# Altium footprint library NTS_Integrated_IC.PcbLib: 8 footprints
Each footprint in its own frame and in the unit in brackets; x right, y up, seen from the top. Pads: shape width x height; smd on the part's side, far side on the other; paste and mask are expansions set on the pad; w line width, h text height; cw(c..) or ccw(c..) is an arc to the next point about the centre after c.
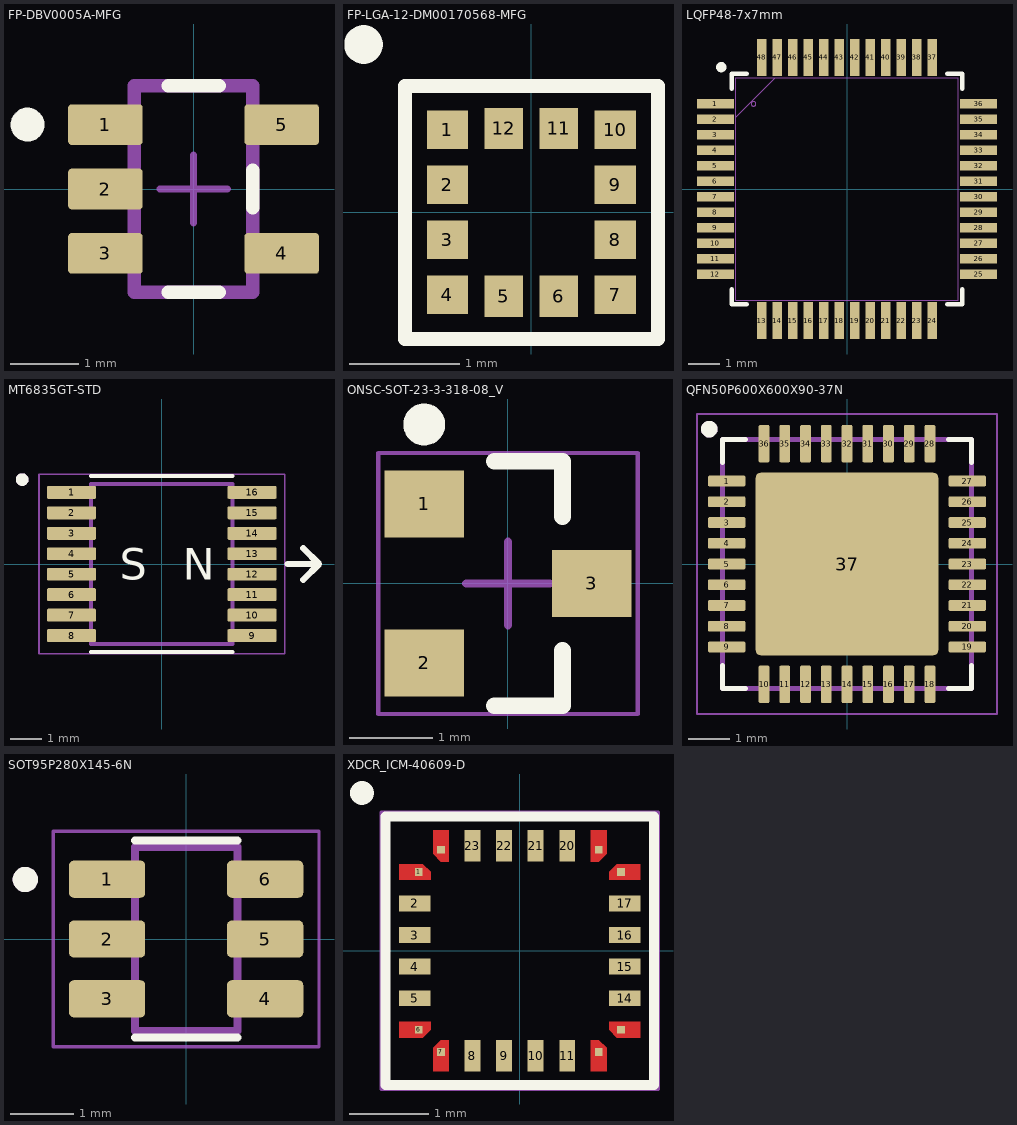
[diagram p0: the footprints below, top view; thin cyan lines are the x and y axes]

## FP-DBV0005A-MFG [mm]
height 8.54
pads (5):
  rrect17% 1.1x0.6 smd paste+0 mask+0: 1(-1.3,0.95) 2(-1.3,0) 3(-1.3,-0.95) 4(1.3,-0.95) 5(1.3,0.95)
Top Overlay:
  circle w0.25: c-2.45,0.95 r0.125
  lines w0.2: -0.375,-1.525 0.375,-1.525 ; -0.375,1.525 0.375,1.525 ; 0.875,-0.275 0.875,0.275
Top 3D Body:
  lines w0.2: -0.875,-1.525 -0.875,1.525 0.875,1.525 0.875,-1.525 -0.875,-1.525
Top Component Center:
  lines w0.1: -0.5,0 0.5,0 ; 0,-0.5 0,0.5
3D body "IC_Texas_Instruments_SN65LVDT2DBVT_eec.STEP": height 0.25, standoff 0, extent -1.95,-1.775 1.95,1.775

## FP-LGA-12-DM00170568-MFG [mm]
height 8.54
pads (12):
  rect 0.375x0.35 smd paste-1000 mask+0: 1(-0.763,0.75) 2(-0.763,0.25) 3(-0.763,-0.25) 4(-0.763,-0.75) 7(0.763,-0.75) 8(0.763,-0.25) 9(0.763,0.25) 10(0.763,0.75)
  rect 0.35x0.375 smd paste-1000 mask+0: 5(-0.25,-0.763) 6(0.25,-0.763) 11(0.25,0.763) 12(-0.25,0.763)
Top Overlay:
  circle w0.25: c-1.525,1.525 r0.05
  lines w0.127: -1.15,-1.15 -1.15,1.15 1.15,1.15 1.15,-1.15 -1.15,-1.15
Top Paste:
  rectangle: -0.93,0.093 -0.595,0.407
  rectangle: 0.595,0.093 0.93,0.407
  rectangle: -0.93,0.593 -0.595,0.907
  rectangle: 0.595,0.593 0.93,0.907
  rectangle: 0.093,0.595 0.407,0.93
  rectangle: -0.407,0.595 -0.093,0.93
  rectangle: -0.93,-0.907 -0.595,-0.593
  rectangle: -0.93,-0.407 -0.595,-0.093
  rectangle: 0.595,-0.407 0.93,-0.093
  rectangle: 0.595,-0.907 0.93,-0.593
  rectangle: 0.093,-0.93 0.407,-0.595
  rectangle: -0.407,-0.93 -0.093,-0.595
3D body "IC_STMicroelectronics_IIS2MDCTR_eec.STEP": height 0.7, standoff 0, extent -1,-1 1,1

## LQFP48-7x7mm [mm]
pads (48):
  rect 1.194x0.305 smd paste+0 mask+0.025: 1(-4.25,2.75) 2(-4.25,2.25) 3(-4.25,1.75) 4(-4.25,1.25) 5(-4.25,0.75) 6(-4.25,0.25) 7(-4.25,-0.25) 8(-4.25,-0.75) 9(-4.25,-1.25) 10(-4.25,-1.75) 11(-4.25,-2.25) 12(-4.25,-2.75) 25(4.25,-2.75) 26(4.25,-2.25) 27(4.25,-1.75) 28(4.25,-1.25) 29(4.25,-0.75) 30(4.25,-0.25) 31(4.25,0.25) 32(4.25,0.75) 33(4.25,1.25) 34(4.25,1.75) 35(4.25,2.25) 36(4.25,2.75)
  rect 0.305x1.194 smd paste+0 mask+0.025: 13(-2.75,-4.25) 14(-2.25,-4.25) 15(-1.75,-4.25) 16(-1.25,-4.25) 17(-0.75,-4.25) 18(-0.25,-4.25) 19(0.25,-4.25) 20(0.75,-4.25) 21(1.25,-4.25) 22(1.75,-4.25) 23(2.25,-4.25) 24(2.75,-4.25) 37(2.75,4.25) 38(2.25,4.25) 39(1.75,4.25) 40(1.25,4.25) 41(0.75,4.25) 42(0.25,4.25) 43(-0.25,4.25) 44(-0.75,4.25) 45(-1.25,4.25) 46(-1.75,4.25) 47(-2.25,4.25) 48(-2.75,4.25)
Top Overlay:
  circle w0.178: c-4.064,3.937 r0.076
  lines w0.152: -3.721,-3.235 -3.721,-3.721 -3.235,-3.721 ; -3.721,3.235 -3.721,3.721 -3.235,3.721 ; 3.235,-3.721 3.721,-3.721 3.721,-3.235 ; 3.235,3.721 3.721,3.721 3.721,3.235
Mechanical 13:
  circle w0.025: c-3.018,2.75 r0.076
  lines w0.025: -3.594,2.324 -2.324,3.594 ; -3.594,-3.594 -3.594,3.594 3.594,3.594 3.594,-3.594 -3.594,-3.594
3D body "LQFP48-7x7mm.step": height 1.6, standoff 0, extent -4.497,-4.497 4.497,4.497

## MT6835GT-STD [mm]
pads (16):
  rrect25% 1.57x0.41 smd paste+0 mask+0.025: 1(-2.87,2.275) 2(-2.87,1.625) 3(-2.87,0.975) 4(-2.87,0.325) 5(-2.87,-0.325) 6(-2.87,-0.975) 7(-2.87,-1.625) 8(-2.87,-2.275) 9(2.87,-2.275) 10(2.87,-1.625) 11(2.87,-0.975) 12(2.87,-0.325) 13(2.87,0.325) 14(2.87,0.975) 15(2.87,1.625) 16(2.87,2.275)
Top Overlay:
  circle w0.2: c-4.44,2.685 r0.1
  lines w0.127: -2.25,-2.8 2.25,-2.8 ; -2.25,2.8 2.25,2.8
  lines w0.2: 4,0 5,0 ; 4.5,-0.5 5,0 ; 4.5,0.5 5,0
  text "N" at 0.667,-0.5 h1
  text "S" at -1.333,-0.5 h1
Mechanical 13:
  circle w0.2: c-4.44,2.685 r0.1
  lines w0.127: -2.25,-2.55 2.25,-2.55 2.25,2.55 -2.25,2.55 -2.25,-2.55
Mechanical 15:
  lines w0.05: -3.905,-2.85 3.905,-2.85 3.905,2.85 -3.905,2.85 -3.905,-2.85
3D body "TSSOP-16 0.65p 4.4mm.step": height 1, standoff 0, extent -3.15,-2.5 3.15,2.5

## ONSC-SOT-23-3-318-08_V [mm] "SOT23, 3-Leads, Body 2.92x1.3mm, Pitch 0.95mm"
height 1.11
pads (3):
  rect 0.95x0.8 smd: 1(-1,0.95) 2(-1,-0.95) 3(1,0)
Top Overlay:
  circle w0.25: c-1,1.9 r0.125
  lines w0.2: -0.165,-1.46 0.65,-1.46 0.65,-0.8 ; -0.165,1.46 0.65,1.46 0.65,0.8
Mechanical 15:
  lines w0.05: -1.55,-1.56 1.55,-1.56 1.55,1.56 -1.55,1.56 -1.55,-1.56
  lines w0.1: -0.5,0 0.5,0 ; 0,-0.5 0,0.5
3D body "BAT54CLT3G.STEP": height 1.11, standoff 0, extent -1.2,-1.45 1.2,1.45

## QFN50P600X600X90-37N [mm]
pads (37):
  rrect25% 0.9x0.26 smd mask+0.051: 1(-2.9,2) 2(-2.9,1.5) 3(-2.9,1) 4(-2.9,0.5) 5(-2.9,0) 6(-2.9,-0.5) 7(-2.9,-1) 8(-2.9,-1.5) 9(-2.9,-2) 19(2.9,-2) 20(2.9,-1.5) 21(2.9,-1) 22(2.9,-0.5) 23(2.9,0) 24(2.9,0.5) 25(2.9,1) 26(2.9,1.5) 27(2.9,2)
  rrect25% 0.26x0.9 smd mask+0.051: 10(-2,-2.9) 11(-1.5,-2.9) 12(-1,-2.9) 13(-0.5,-2.9) 14(0,-2.9) 15(0.5,-2.9) 16(1,-2.9) 17(1.5,-2.9) 18(2,-2.9) 28(2,2.9) 29(1.5,2.9) 30(1,2.9) 31(0.5,2.9) 32(0,2.9) 33(-0.5,2.9) 34(-1,2.9) 35(-1.5,2.9) 36(-2,2.9)
  rrect5% 4.4x4.4 smd paste-3 mask+0.051: 37(0,0)
Top Overlay:
  circle w0.2: c-3.32,3.25 r0.1
  lines w0.127: -3,-2.45 -3,-3 -2.45,-3 ; -3,2.45 -3,3 -2.45,3 ; 2.45,-3 3,-3 3,-2.45 ; 2.45,3 3,3 3,2.45
Top Paste:
  region: 1.8,-1.8 0.4,-1.8 0.4,-0.4 1.8,-0.4
  region: -0.4,-1.8 -1.8,-1.8 -1.8,-0.4 -0.4,-0.4
  region: 1.8,0.4 0.4,0.4 0.4,1.8 1.8,1.8
  region: -0.4,0.4 -1.8,0.4 -1.8,1.8 -0.4,1.8
Mechanical 13:
  circle w0.2: c-3.32,3.25 r0.1
  lines w0.127: -3,-3 -3,3 3,3 3,-3 -3,-3
Mechanical 15:
  lines w0.05: -3.615,-3.615 -3.615,3.615 3.615,3.615 3.615,-3.615 -3.615,-3.615
3D body "step_temp.STEP": height 1, standoff 0, extent -3,-3 3,3

## SOT95P280X145-6N [mm]
pads (6):
  rrect25% 1.21x0.59 smd mask+0.051: 1(-1.255,0.95) 2(-1.255,0) 3(-1.255,-0.95) 4(1.255,-0.95) 5(1.255,0) 6(1.255,0.95)
Top Overlay:
  circle w0.2: c-2.555,0.945 r0.1
  lines w0.127: -0.813,-1.565 0.813,-1.565 ; -0.813,1.565 0.813,1.565
Top 3D Body:
  circle w0.2: c-2.555,0.945 r0.1
  lines w0.127: -0.813,-1.462 0.813,-1.462 0.813,1.462 -0.813,1.462 -0.813,-1.462
Mechanical 15:
  lines w0.05: -2.11,-1.713 -2.11,1.713 2.11,1.713 2.11,-1.713 -2.11,-1.713
3D body "step_temp.STEP": height 1.42, standoff -0.03, extent -1.4,-1.462 1.4,1.462

## XDCR_ICM-40609-D [mm]
height 0.97
pads (24):
  rect 0.1x0.1 smd paste-1 mask+0: 1(-1.28,1) 6(-1.28,-1) 7(-1,-1.28) 12(1,-1.28) 13(1.28,-1) 18(1.28,1) 19(1,1.28) 24(-1,1.28)
  rect 0.4x0.2 smd paste-0.006 mask+0.025: 2(-1.33,0.6) 3(-1.33,0.2) 4(-1.33,-0.2) 5(-1.33,-0.6) 14(1.33,-0.6) 15(1.33,-0.2) 16(1.33,0.2) 17(1.33,0.6)
  rect 0.2x0.4 smd paste-0.006 mask+0.025: 8(-0.6,-1.33) 9(-0.2,-1.33) 10(0.2,-1.33) 11(0.6,-1.33) 20(0.6,1.33) 21(0.2,1.33) 22(-0.2,1.33) 23(-0.6,1.33)
Top Layer:
  region: 1.525,-1.1 1.23,-1.1 1.13,-1 1.13,-0.9 1.525,-0.9
  region: -1.13,1 -1.13,0.9 -1.525,0.9 -1.525,1.1 -1.23,1.1
  region: -1.13,-1 -1.23,-1.1 -1.525,-1.1 -1.525,-0.9 -1.13,-0.9
  region: -0.9,-1.525 -1.1,-1.525 -1.1,-1.23 -1,-1.13 -0.9,-1.13
  region: 1.1,-1.23 1.1,-1.525 0.9,-1.525 0.9,-1.13 1,-1.13
  region: 1.525,0.9 1.13,0.9 1.13,1 1.23,1.1 1.525,1.1
  region: 1.1,1.23 1,1.13 0.9,1.13 0.9,1.525 1.1,1.525
  region: -0.9,1.13 -1,1.13 -1.1,1.23 -1.1,1.525 -0.9,1.525
Top Overlay:
  circle w0.2: c-2,2 r0.05
  lines w0.127: -1.7,-1.615 -1.7,-1.7 1.6,-1.7 ; -1.7,-1.6 -1.7,1.7 0.025,1.7 1.7,1.7 1.7,1.615 ; 1.615,-1.7 1.7,-1.7 1.7,1.6
Mechanical 15:
  lines w0.05: -1.75,-1.75 1.75,-1.75 1.75,1.75 -1.75,1.75 -1.75,-1.75
3D body "LGA24_ICM-40609_IVS.step": height 0.97, standoff 0, extent -1.549,-1.549 1.549,1.549